# Altium footprint library XM_Power.PcbLib: 14 footprints
Each footprint in its own frame and in the unit in brackets; x right, y up, seen from the top. Pads: shape width x height; smd on the part's side, far side on the other; paste and mask are expansions set on the pad; w line width, h text height; cw(c..) or ccw(c..) is an arc to the next point about the centre after c.
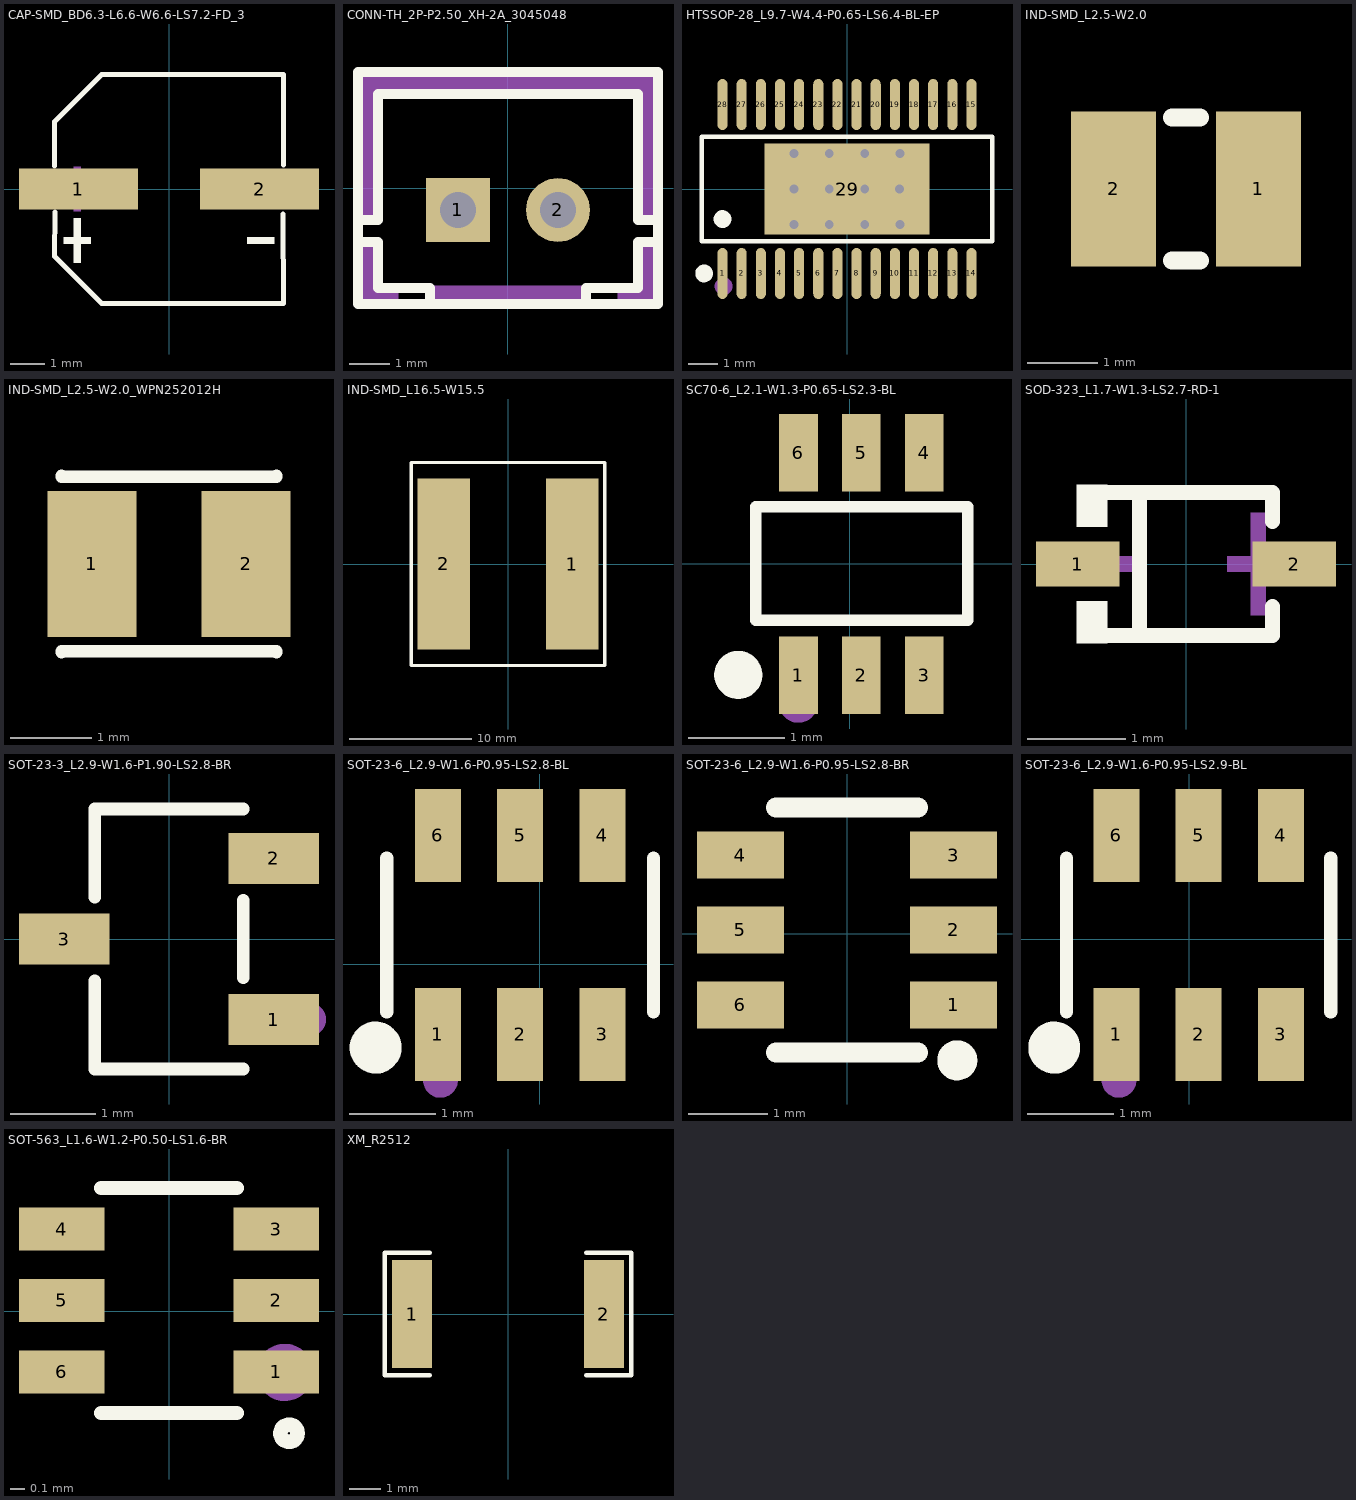
[diagram p0: the footprints below, top view; thin cyan lines are the x and y axes]

## CAP-SMD_BD6.3-L6.6-W6.6-LS7.2-FD_3 [mm]
pads (2):
  rect 3.5x1.2 smd paste+0 mask+0.051: 1(-2.67,0) 2(2.67,0)
Top Overlay:
  region: 3.102,-1.419 3.102,-1.617 2.31,-1.617 2.31,-1.419
  region: -3.102,-1.419 -3.102,-1.617 -2.31,-1.617 -2.31,-1.419
  region: -2.805,-0.858 -2.805,-2.178 -2.607,-2.178 -2.607,-0.858
  lines w0.152: -3.376,0.686 -3.376,1.98 -1.98,3.376 3.376,3.376 3.369,0.707 ; -3.362,-0.686 -3.376,-1.981 -1.981,-3.376 3.376,-3.376 3.356,-0.74
Mechanical 15:
  region: 3.102,0.099 3.102,-0.099 2.31,-0.099 2.31,0.099
  region: -3.102,0.099 -3.102,-0.099 -2.31,-0.099 -2.31,0.099
  region: -2.805,0.66 -2.805,-0.66 -2.607,-0.66 -2.607,0.66
3D body "C42436545-81a4a7edc74a48caa43374d9db552ca0.step": height 5.4, standoff -0.02, extent -3.6,-3.3 3.6,3.3

## CONN-TH_2P-P2.50_XH-2A_3045048 [mm]
pads (2):
  rect 1.6x1.6 hole 0.9 paste-2539.97 mask+0.05: 1(-1.25,-0.55)
  round 1.6 hole 0.9 paste-2539.97 mask+0.05: 2(1.25,-0.55)
Top Overlay:
  lines w0.254: -3.75,-0.799 -3.25,-0.799 -3.25,2.35 3.25,2.35 3.25,-0.8 3.75,-0.8 ; -3.749,-1.348 -3.249,-1.348 -3.249,-2.501 -2.751,-2.501 -1.951,-2.501 -1.951,-2.899 -2.751,-2.899 ; 2.75,-2.9 1.95,-2.9 1.95,-2.501 2.75,-2.501 3.248,-2.501 3.248,-1.348 3.749,-1.348 ; -3.75,-2.9 3.75,-2.9 3.75,2.9 -3.75,2.9 -3.75,-2.9
Mechanical 15:
  region: -3.249,-0.8 -3.75,-0.8 -3.75,2.9 3.75,2.9 3.75,-0.8 3.25,-0.8 3.25,2.367 -3.249,2.367
  region: 2.75,-2.45 3.242,-2.45 3.25,-2.458 3.25,-1.3 3.751,-1.3 3.751,-2.9 3.75,-2.9 2.751,-2.9 2.75,-2.899
  region: -1.9,-2.95 -1.9,-2.45 1.9,-2.45 1.9,-2.95
  region: -2.75,-2.5 -3.241,-2.5 -3.249,-2.508 -3.249,-1.35 -3.75,-1.35 -3.75,-2.95 -2.751,-2.95 -2.75,-2.949
3D body "C7432682-94494a39364f4b3eb6f3eb33d14a735f.step": height 3.6, standoff -6.8, extent -3.75,-2.91 3.75,2.9

## HTSSOP-28_L9.7-W4.4-P0.65-LS6.4-BL-EP [mm]
pads (29):
  oval 0.343x1.731 smd paste+0 mask+0.051: 1(-4.225,-2.866) 2(-3.575,-2.866) 3(-2.925,-2.866) 4(-2.275,-2.866) 5(-1.625,-2.866) 6(-0.975,-2.866) 7(-0.325,-2.866) 8(0.325,-2.866) 9(0.975,-2.866) 10(1.625,-2.866) 11(2.275,-2.866) 12(2.925,-2.866) 13(3.575,-2.866) 14(4.225,-2.866) 15(4.225,2.866) 16(3.575,2.866) 17(2.925,2.866) 18(2.275,2.866) 19(1.625,2.866) 20(0.975,2.866) 21(0.325,2.866) 22(-0.325,2.866) 23(-0.975,2.866) 24(-1.625,2.866) 25(-2.275,2.866) 26(-2.925,2.866) 27(-3.575,2.866) 28(-4.225,2.866)
  rect 5.6x3.1 smd paste+0 mask+0.05: 29(0,0)
via 1.8,-1.2 diameter 0.5 hole 0.3
via -0.6,0 diameter 0.5 hole 0.3
via 0.6,-1.2 diameter 0.5 hole 0.3
via -0.6,-1.2 diameter 0.5 hole 0.3
via -0.6,1.2 diameter 0.5 hole 0.3
via -1.8,-1.2 diameter 0.5 hole 0.3
via -1.8,0 diameter 0.5 hole 0.3
via -1.8,1.2 diameter 0.5 hole 0.3
via 0.6,0 diameter 0.5 hole 0.3
via 1.778,0 diameter 0.5 hole 0.3
via 0.6,1.2 diameter 0.5 hole 0.3
via 1.8,1.2 diameter 0.5 hole 0.3
Top Overlay:
  circle w0.3: c-4.225,-1.019 r0.15
  circle w0.3: c-4.849,-2.866 r0.15
  lines w0.152: -4.926,-1.771 -4.926,1.771 4.926,1.771 4.926,-1.771 -4.926,-1.771
Mechanical 15:
  circle w0.3: c-4.191,-3.302 r0.15
3D body "C442493-8cb208170c6a49d2a22c82795805910d.step": height 0.55, standoff -0.65, extent -4.85,-3.2 4.85,3.2

## IND-SMD_L2.5-W2.0 [mm]
pads (2):
  rect 1.2x2.2 smd paste+0 mask+0.051: 1(458.019,-342.816) 2(455.963,-342.816)
Top Overlay:
  lines w0.254: 456.794,-343.832 457.188,-343.832 ; 456.794,-341.8 457.188,-341.8
3D body "C5832376-31c78ce47d6348f68c39f00fe49916a1.step": height 1.2, standoff 0, extent 455.731,-343.816 458.251,-341.816

## IND-SMD_L2.5-W2.0_WPN252012H [mm]
pads (2):
  rect 1.1x1.8 smd paste+0 mask+0.051: 1(456.105,-342.805) 2(458.005,-342.805)
Top Overlay:
  lines w0.152: 455.729,-343.893 455.729,-343.882 458.381,-343.882 458.381,-343.893 ; 455.729,-341.718 455.729,-341.729 458.381,-341.729 458.381,-341.718
3D body "C98354-3d4f69c746894ffda952d59780490348.step": height 1.2, standoff -0.01, extent 455.795,-343.805 458.315,-341.805

## IND-SMD_L16.5-W15.5 [mm]
pads (2):
  rect 4.3x14 smd paste+0 mask+0.051: 1(5.25,0) 2(-5.25,0)
Top Overlay:
  lines w0.254: -7.9,-8.3 7.9,-8.3 7.9,8.3 -7.7,8.3 -7.9,8.3 -7.9,-8.3
3D body "C5445342-c5a670a6ecca4934a764840ea9e5ff34.step": height 7.7, standoff 0, extent -7.75,-8.25 7.751,8.25

## SC70-6_L2.1-W1.3-P0.65-LS2.3-BL [mm]
pads (6):
  rect 0.4x0.8 smd paste+0 mask+0.051: 1(-0.532,-1.15) 2(0.118,-1.15) 3(0.768,-1.15) 4(0.768,1.15) 5(0.118,1.15) 6(-0.532,1.15)
Top Overlay:
  lines w0.12: -0.972,-0.58 -0.962,-0.58 1.218,-0.58 1.218,-0.57 1.218,0.59 -0.972,0.59 -0.972,-0.58
  lines w0.249: -1.155,-1.27 cw(c-1.153,-1.146) -1.152,-1.27
Mechanical 15:
  circle w0.2: c-0.532,-1.44 r0.1
3D body "C2902349-dad0ea1f1d2f4e5dbb54d48672493581.step": height 0.48, standoff -0.53, extent -0.932,-1.15 1.168,1.15

## SOD-323_L1.7-W1.3-LS2.7-RD-1 [mm]
pads (2):
  rect 0.845x0.455 smd paste+0 mask+0.051: 1(-1.098,0) 2(1.098,0)
Top Overlay:
  region: -0.8,-0.802 -0.8,-0.38 -1.105,-0.38 -1.105,-0.802
  region: -0.8,0.802 -0.8,0.38 -1.105,0.38 -1.105,0.802
  lines w0.152: -0.876,-0.726 0.876,-0.726 0.876,-0.431 ; -0.876,0.726 0.876,0.726 0.876,0.431 ; -0.472,-0.726 -0.472,0.726
Mechanical 15:
  region: 0.81,0.52 0.81,-0.52 0.654,-0.52 0.654,0.52
  region: 1.044,0.078 1.044,-0.078 0.42,-0.078 0.42,0.078
  region: -1.044,0.078 -1.044,-0.078 -0.42,-0.078 -0.42,0.078
3D body "C7380001-757646324636429f99fbd84de197ef08.step": height 0.45, standoff -0.5, extent -1.325,-0.65 1.325,0.65

## SOT-23-3_L2.9-W1.6-P1.90-LS2.8-BR [mm]
pads (3):
  rect 1.07x0.6 smd paste+0 mask+0.051: 1(1.235,-0.95) 2(1.235,0.95) 3(-1.235,0)
Top Overlay:
  lines w0.152: -0.876,-0.495 -0.876,-1.536 0.876,-1.536 ; -0.876,0.495 -0.876,1.536 0.876,1.536 ; 0.876,-0.455 0.876,0.455
Mechanical 15:
  circle w0.2: c1.651,-0.95 r0.1
3D body "C486069-cefd4596db214da394d9632b2b88f8f2.step": height 1.1, standoff 0, extent -1.4,-1.45 1.4,1.45

## SOT-23-6_L2.9-W1.6-P0.95-LS2.8-BL [mm]
pads (6):
  rect 0.532x1.072 smd paste+0 mask+0.051: 1(-1.18,-0.809) 2(-0.23,-0.809) 3(0.72,-0.809) 4(0.72,1.489) 5(-0.23,1.489) 6(-1.18,1.489)
Top Overlay:
  circle w0.3: c-1.898,-0.961 r0.15
  lines w0.152: -1.769,-0.549 -1.769,1.229 ; 1.309,-0.549 1.309,1.229
Mechanical 15:
  circle w0.2: c-1.15,-1.34 r0.1
3D body "C144198-229b69761e2c45dba6a83d8866dec72d.step": height 1.6, standoff -0.05, extent -1.68,-1.066 1.22,1.746

## SOT-23-6_L2.9-W1.6-P0.95-LS2.8-BR [mm]
pads (6):
  rect 1.1x0.6 smd paste+0 mask+0.051: 1(1.35,-0.899) 2(1.35,0.051) 3(1.35,1.001) 4(-1.35,1.001) 5(-1.35,0.051) 6(-1.35,-0.899)
Top Overlay:
  circle w0.254: c1.397,-1.6 r0.127
  lines w0.254: -0.9,-1.5 0.9,-1.5 ; -0.9,1.6 0.9,1.6
Mechanical 15:
  circle w0.2: c1.4,-0.899 r0.1
3D body "C5341122-229b69761e2c45dba6a83d8866dec72d.step": height 1.6, standoff -0.05, extent -1.406,-1.399 1.406,1.501

## SOT-23-6_L2.9-W1.6-P0.95-LS2.9-BL [mm]
pads (6):
  rect 0.532x1.072 smd paste+0 mask+0.051: 1(-0.842,-1.101) 2(0.108,-1.101) 3(1.058,-1.101) 4(1.058,1.197) 5(0.108,1.197) 6(-0.842,1.197)
Top Overlay:
  circle w0.3: c-1.56,-1.254 r0.15
  lines w0.152: -1.419,-0.842 -1.419,0.937 ; 1.634,-0.842 1.634,0.937
Mechanical 15:
  circle w0.2: c-0.812,-1.632 r0.1
3D body "C7465501-6f37130fd61d48febac97e962793fd76.step": height 0.4, standoff -0.75, extent -1.342,-1.402 1.558,1.498

## SOT-563_L1.6-W1.2-P0.50-LS1.6-BR [mm]
pads (6):
  rect 0.6x0.3 smd paste+0 mask+0.051: 1(0.75,-0.424) 2(0.75,0.076) 3(0.75,0.576) 4(-0.75,0.576) 5(-0.75,0.076) 6(-0.75,-0.424)
Top Overlay:
  circle w0.102: c0.84,-0.854 r0.06
  lines w0.1: -0.475,-0.711 0.475,-0.711 ; -0.475,0.864 0.475,0.864
Mechanical 15:
  circle w0.2: c0.81,-0.427 r0.1
3D body "C99269-ec2270bac0544bf5afe06b24e8356512.step": height 0.61, standoff 0, extent -0.8,-0.724 0.8,0.876

## XM_R2512 [mm]
pads (2):
  rect 1.283x3.456 smd paste-100 mask+0.051: 1(-3.066,0) 2(3.066,0)
Top Overlay:
  lines w0.152: -2.501,-1.957 -3.936,-1.957 -3.936,1.957 -2.501,1.957 ; 2.501,-1.957 3.936,-1.957 3.936,1.957 2.501,1.957
Top Paste:
  region: -2.425,-1.628 -2.425,-0.688 -2.525,-0.588 -2.761,-0.588 -2.861,-0.488 -2.861,0.488 -2.761,0.588 -2.525,0.588 -2.425,0.688 -2.425,1.628 -2.525,1.728 -3.608,1.728 -3.708,1.628 -3.708,-1.628 -3.608,-1.728 -2.525,-1.728
  region: 2.425,-1.628 2.425,-0.688 2.525,-0.588 2.761,-0.588 2.861,-0.488 2.861,0.488 2.761,0.588 2.525,0.588 2.425,0.688 2.425,1.628 2.525,1.728 3.608,1.728 3.708,1.628 3.708,-1.628 3.608,-1.728 2.525,-1.728
3D body "C5375417-311a5ea298274ff3b9740151e78a7465.step": height 0.61, standoff 0, extent -3.15,-1.6 3.15,1.6